# Altium schematic symbol library S5AC-13-F.SchLib: 1 symbol
Pins are listed as number, name and electrical type; pins without a type are passive.

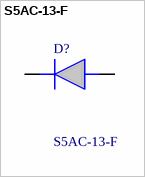
[diagram p0: symbol S5AC-13-F]

## S5AC-13-F
designator D?
Diodes Inc S5AC-13-F, SMT Diode, 50V 5A, 2-Pin DO-214AB; Manufacturer_Name: Diodes Incorporated; Geometry.Height: 2.5mm; Mouser Part Number: 621-S5AC-F; Mouser Price/Stock: https://www.mouser.co.uk/ProductDetail/Diodes-Incorporated/S5AC-13-F?qs=O8dk3f7hbgu4ZnJ2CunXCw%3D%3D; Manufacturer_Part_Number: S5AC-13-F; Datasheet Link: https://www.diodes.com/assets/Datasheets/ds16007.pdf
footprint DIOM7959X250N
pins: 1 K, 2 A